# Altium schematic symbol library Solar_BMS.SchLib: 12 symbols
Pins are listed as number, name and electrical type; pins without a type are passive.

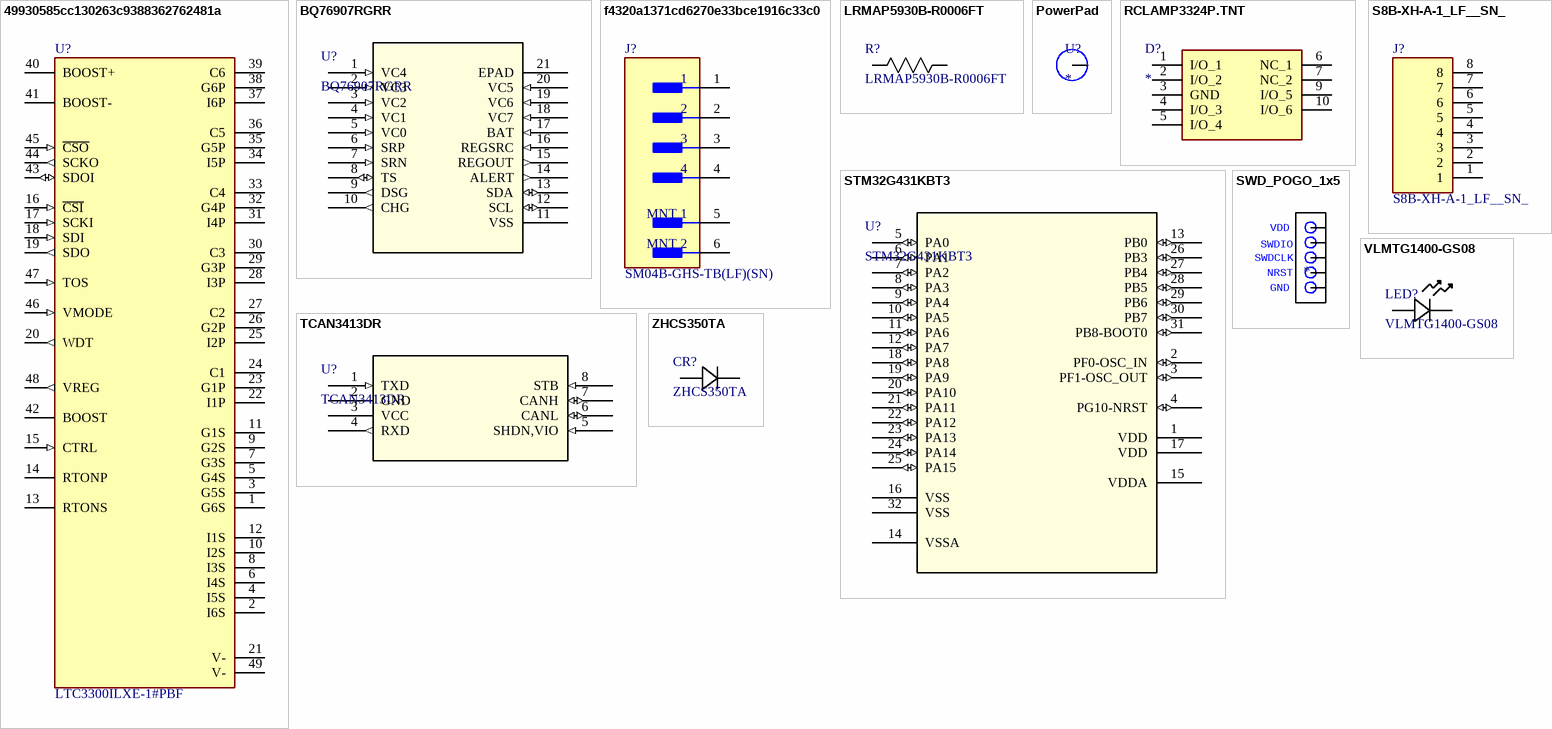
[diagram p0: symbols 49930585cc130263c9388362762481a to ZHCS350TA]

## 49930585cc130263c9388362762481a
designator U?, comment LTC3300ILXE-1#PBF
IC BATT BAL MULTI 1-12C 48ELQFP; Number of Batteries: 6; Interface: Serial; Max Supply Voltage: 36V; REACH SVHC: No SVHC; Case/Package: LQFP; Number of Pins: 48; Max Operating Temperature: 125°C; Package Quantity: 250; Min Operating Temperature: -40°C; Packaging: Tray
footprint FP-LXE-48-05-08-1832-BB-IPC_C
footprint FP-LXE-48-05-08-1832-BB-IPC_B
footprint FP-LXE-48-05-08-1832-BB-MFG
footprint FP-LXE-48-05-08-1832-BB-IPC_A
pins: 1 G6S, 2 I6S, 3 G5S, 4 I5S, 5 G4S, 6 I4S, 7 G3S, 8 I3S, 9 G2S, 10 I2S, 11 G1S, 12 I1S, 13 RTONS, 14 RTONP, 15 CTRL (in), 16 ~{CSI} (in), 17 SCKI (in), 18 SDI (in), 19 SDO (out), 20 WDT (out), 21 V- (power), 22 I1P, 23 G1P, 24 C1, 25 I2P, 26 G2P, 27 C2, 28 I3P, 29 G3P, 30 C3, 31 I4P, 32 G4P, 33 C4, 34 I5P, 35 G5P, 36 C5, 37 I6P, 38 G6P, 39 C6, 40 BOOST+, 41 BOOST-, 42 BOOST, 43 SDOI (io), 44 SCKO (out), 45 ~{CSO} (in), 46 VMODE (in), 47 TOS (in), 48 VREG (out), 49 V- (power)

## BQ76907RGRR
designator U?
Low-power monitor and protector for 2S to 7S with high accuracy cell voltage measurement 20-VQFN -40 to 110; Manufacturer_Name: Texas Instruments; Type: Power Management; Copyright: Copyright (C) 2026 Ultra Librarian. All rights reserved.; Manufacturer_Part_Number: BQ76907RGRR; RefDes: RefDes
footprint VQFN20_RGR_TEX
pins: 1 VC4 (in), 2 VC3 (in), 3 VC2 (in), 4 VC1 (in), 5 VC0 (in), 6 SRP (in), 7 SRN (in), 8 TS (io), 9 DSG (out), 10 CHG (out), 11 VSS (power), 12 SCL (io), 13 SDA (io), 14 ALERT (out), 15 REGOUT (out), 16 REGSRC (in), 17 BAT (in), 18 VC7 (in), 19 VC6 (in), 20 VC5 (in), 21 EPAD

## f4320a1371cd6270e33bce1916c33c0
designator J?, comment SM04B-GHS-TB(LF)(SN)
Connector Header, GH Series, 4 Position, 1.25mm, 30-26 AWG, 50V, Surface Mount, Right Angle, Solder, Locking Ramp
footprint FP-SM04B-GHS-TB_LF_SN-MFG
pins: 1, 2, 3, 4, 5 MNT 1, 6 MNT 2

## LRMAP5930B-R0006FT
designator R?
Description; Manufacturer_Name: TT Electronics; Copyright: Copyright (C) 2025 Ultra Librarian. All rights reserved.; Manufacturer_Part_Number: LRMAP5930B-R0006FT
footprint RES_R0006FT_WEL
pins: 1, 2

## PowerPad
designator U?
Value: *; HelpURL: *; MPN: *; classname: *
pins: 1

## RCLAMP3324P.TNT
designator D?
TVS Diode (Bi-directional); Manufacturer_Name: SEMTECH; Manufacturer_Part_Number: RCLAMP3324P.TNT; Datasheet Link: https://datasheet.datasheetarchive.com/originals/distributors/DKDS42/DSANUWW0050316.pdf; Height: 0.63mm; Mouser Part Number: 947-RCLAMP3324P.TNT; Mouser Price/Stock: https://www.mouser.co.uk/ProductDetail/Semtech/RCLAMP3324P.TNT?qs=rBWM4%252BvDhIcjIdOyxs8eng%3D%3D; Arrow Part Number: RCLAMP3324P.TNT; Arrow Price/Stock: https://www.arrow.com/en/products/rclamp3324p.tnt/semtech?utm_currency=USD&region=europe
footprint RCLAMP3324PTNT
pins: 1 I/O_1, 2 I/O_2, 3 GND, 4 I/O_3, 5 I/O_4, 6 NC_1, 7 NC_2, 9 I/O_5, 10 I/O_6

## S8B-XH-A-1_LF__SN_
designator J?
Connector; Manufacturer_Name: JST (JAPAN SOLDERLESS TERMINALS); Manufacturer_Part_Number: S8B-XH-A-1(LF)(SN); Datasheet Link: http://www.jst-mfg.com/product/pdf/eng/eXH.pdf; Height: 6.1mm; Mouser Part Number: 306-S8BXHA1LFSN; Mouser Price/Stock: https://www.mouser.co.uk/ProductDetail/JST-Commercial/S8B-XH-A-1LFSN?qs=QpmGXVUTftFKLlmLzIYjBQ%3D%3D; Arrow Part Number: S8B-XH-A-1(LF)(SN); Arrow Price/Stock: https://www.arrow.com/en/products/s8b-xh-a-1-lf-sn/jst-manufacturing?region=europe
footprint S8BXHA1LFSN
pins: 1, 2, 3, 4, 5, 6, 7, 8

## STM32G431KBT3
designator U?
Mainstream Arm Cortex-M4 MCU 170 MHz with 128 Kbytes of Flash memory, Math Accelerator, Medium Analog level integration; Manufacturer_Name: STMicroelectronics; Copyright: Copyright (C) 2026 Ultra Librarian. All rights reserved.; Manufacturer_Part_Number: STM32G431KBT3; Datasheet: https://www.st.com/resource/en/datasheet/stm32g431c6.pdf; RefDes: RefDes; Type: Type
footprint LQFP-32_STM
pins: 1 VDD (power), 2 PF0-OSC_IN (io), 3 PF1-OSC_OUT (io), 4 PG10-NRST (io), 5 PA0 (io), 6 PA1 (io), 7 PA2 (io), 8 PA3 (io), 9 PA4 (io), 10 PA5 (io), 11 PA6 (io), 12 PA7 (io), 13 PB0 (io), 14 VSSA (power), 15 VDDA (power), 16 VSS (power), 17 VDD (power), 18 PA8 (io), 19 PA9 (io), 20 PA10 (io), 21 PA11 (io), 22 PA12 (io), 23 PA13 (io), 24 PA14 (io), 25 PA15 (io), 26 PB3 (io), 27 PB4 (io), 28 PB5 (io), 29 PB6 (io), 30 PB7 (io), 31 PB8-BOOT0 (io), 32 VSS (power)

## SWD_POGO_1x5
designator ?
footprint SWD_pogo_program
pins: 1, 2, 3, 4, 5
text: VDD; SWDIO; SWDCLK; NRST; GND

## TCAN3413DR
designator U?
3.3-V CAN FD transceiver with flexible IO and standby mode 8-SOIC -40 to 125; Manufacturer_Name: Texas Instruments; Copyright: Copyright (C) 2026 Ultra Librarian. All rights reserved.; Manufacturer_Part_Number: TCAN3413DR; Datasheet: https://www.ti.com/lit/gpn/tcan3413; RefDes: RefDes; Type: Type
footprint SOIC-8_D0008A_TEX
pins: 1 TXD (in), 2 GND (power), 3 VCC (power), 4 RXD (out), 5 SHDN,VIO (in), 6 CANL (io), 7 CANH (io), 8 STB (in)

## VLMTG1400-GS08
designator LED?
CHIPLED (0603) TRUEGREEN HIGHBRIGHT -e4; Manufacturer_Name: Vishay; Copyright: Copyright (C) 2025 Ultra Librarian. All rights reserved.; Manufacturer_Part_Number: VLMTG1400-GS08
footprint LED_400-GS08_VIS
pins: 1, 2

## ZHCS350TA
designator CR?
Description; Manufacturer_Name: Diodes Inc; Copyright: Copyright (C) 2026 Ultra Librarian. All rights reserved.; Manufacturer_Part_Number: ZHCS350TA
footprint CR_350TA_DIO
pins: 1, 2